# Altium footprint library KLS7-TS5401.PcbLib: 1 footprints
Each footprint in its own frame and in the unit in brackets; x right, y up, seen from the top. Pads: shape width x height; smd on the part's side, far side on the other; paste and mask are expansions set on the pad; w line width, h text height; cw(c..) or ccw(c..) is an arc to the next point about the centre after c.
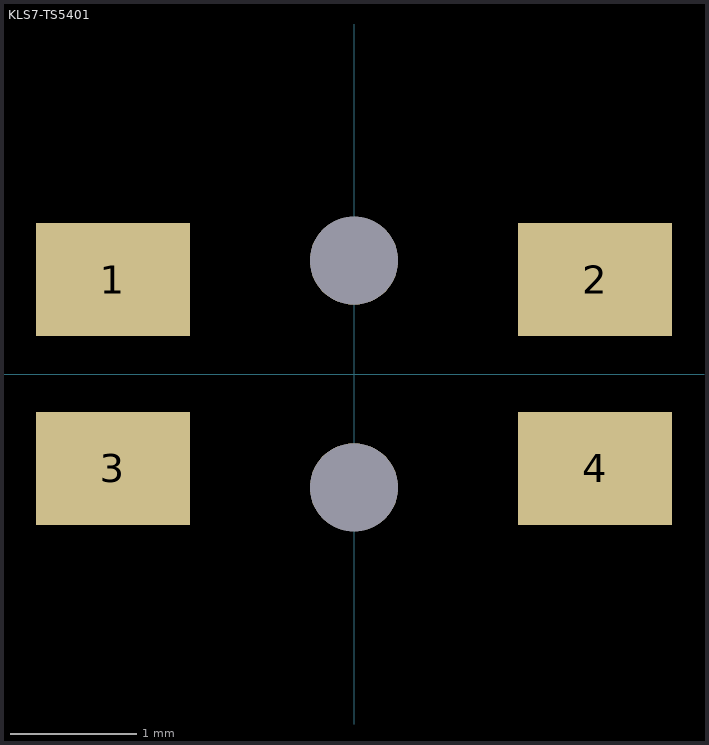
[diagram p0: the footprint, top view; thin cyan lines are the x and y axes]

## KLS7-TS5401 [mm]
pads (6):
  rect 1.225x0.9 smd mask+0.2: 1(-1.913,0.75) 2(1.913,0.75) 3(-1.913,-0.75) 4(1.913,-0.75)
  round 0.7 hole 0.7 unplated: ""(0,-0.9) ""(0,0.9)
Top Layer:
3D body "KLS7-TS5401-1.35-250-B_corrected.step": height 1.35, standoff -0.4, extent -2.325,-1.825 2.325,1.825